# Altium integrated library Grippy_Diddy_Proj.IntLib: 5 symbols
Pins are listed as number, name and electrical type; pins without a type are passive.

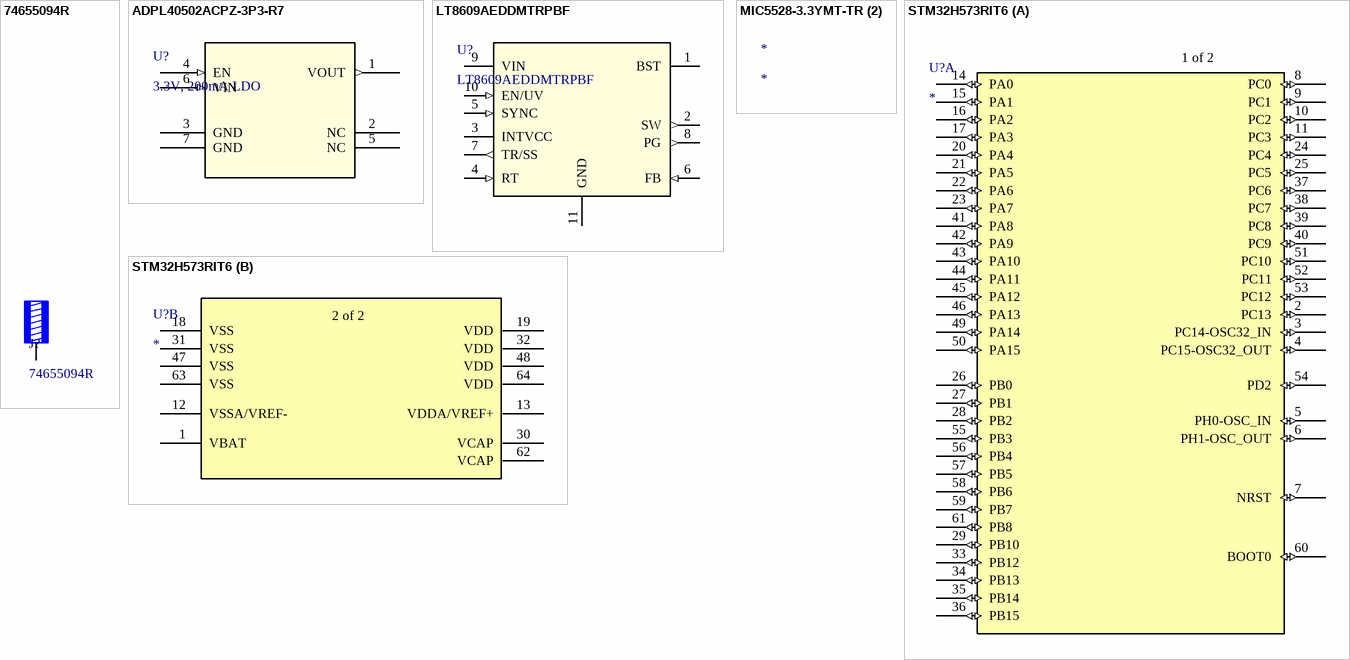
[diagram p0: symbols 74655094R to STM32H573RIT6]

## 74655094R
designator J?
WP-THRBU REDCUBE THR internal through-hole thread, M4 x 2.5mm, 50A; ComponentLink1Description: website; ComponentLink1URL: https://www.we-online.com/redexpert/article/74650074R?ad; ComponentLink2Description: datasheet; ComponentLink2URL: https://www.we-online.com/redexpert/spec/74650074R?ad
footprint 74655094R (REDCUBE THR with internal thread, M4x2.5mm, through)
pins: 1
text: /

## ADPL40502ACPZ-3P3-R7
designator U?, comment 3.3V, 200mA LDO
footprint LFCSP-UD (2x2)
pins: 1 VOUT (out), 2 NC, 3 GND (power), 4 EN (in), 5 NC, 6 VIN (in), 7 GND (power)

## LT8609AEDDMTRPBF
designator U?
Buck Switching Regulator IC Positive Adjustable 0.782V 1 Output 3A 10-WFDFN Exposed Pad; ComponentLink1Description: Digikey; ComponentLink1URL: https://www.digikey.com/en/products/detail/analog-devices-inc/LT8609AEDDM-TRPBF/10668739; ComponentLink2Description: Datasheet; ComponentLink2URL: https://www.analog.com/media/en/technical-documentation/data-sheets/LT8609-8609A-8609B.pdf
footprint 10-WDFN
pins: 1 BST (power), 2 SW (out), 3 INTVCC (power), 4 RT (in), 5 SYNC (in), 6 FB (in), 7 TR/SS (out), 8 PG (out), 9 VIN (power), 10 EN/UV (in), 11 GND (power)

## MIC5528-3.3YMT-TR (2)
designator *
LDO Voltage Regulator, Fixed, 2.5 V to 5.5 V, 1 Output, 260mV @ 500mA, 3.3 V, 500 mA, 6 Pins; Manufacturer: Microchip; Manufacturer Part Number: MIC5528-3.3YMT-TR; Manufacturer Lifecycle Status: REL; Accuracy: 2%; Max Junction Temperature (Tj): 125°C; Max Supply Voltage: 5.5V; Min Supply Voltage: 2.5V; Number of Channels: 1; Output Voltage: 3.3V; Supplier: Newark; Supplier Part Number: MIC5528-3.3YMT-TR; RoHS: Compliant; Category: LDO Voltage Regulators; Stock: 9336; Pricing: 1=0.314, 50=0.284, 100=0.278 (USD); Projected EOL Date: 2039-05-19; Country of Assembly: China; Country of Fabrication: South Korea; Country of Origin: China; Dropout Voltage: 260mV; Export Control Classification Number (ECCN) Code: EAR99; Height: 600µm; HS Code: 8542.39.0090; Harmonized Tariff Schedule (HTS) Code: 8542.39.0060; Lifecycle Status: Production; Max Operating Temperature: 125°C; Min Operating Temperature: -40°C; Number of Outputs: 1; Pins: 6; Output Current: 500mA; Schedule B: 8542390000, 8542390000|8542390000|8542390000|8542390000|8542390000; ComponentLink1URL: https://datasheet.octopart.com:443/MIC5528-3.3YMT-TR-Microchip-datasheet-147335848.pdf?src-supplier=Microchip; ComponentLink1Description: https://datasheet.octopart.com:443/MIC5528-3.3YMT-TR-Microchip-datasheet-147335848.pdf?src-supplier=Microchip; ComponentLink2URL: https://datasheet.octopart.com:443/MIC5528-3.3YMT-TR-Microchip-datasheet-33028824.pdf?src-supplier=SHENGYU+ELECTRONICS; ComponentLink2Description: https://datasheet.octopart.com:443/MIC5528-3.3YMT-TR-Microchip-datasheet-33028824.pdf?src-supplier=SHENGYU+ELECTRONICS; ComponentLink3URL: https://datasheet.octopart.com:443/MIC5528-3.3YMT-TR-Microchip-datasheet-154741890.pdf?src-supplier=Electro+Sonic; ComponentLink3Description: https://datasheet.octopart.com:443/MIC5528-3.3YMT-TR-Microchip-datasheet-154741890.pdf?src-supplier=Electro+Sonic; ComponentLink4URL: http://sigma.octopart.com:80/188455757/materials_sheet/Microchip-MIC5528-3.3YMT-TR.pdf?src-supplier=Compliance+Statements; ComponentLink4Description: http://sigma.octopart.com:80/188455757/materials_sheet/Microchip-MIC5528-3.3YMT-TR.pdf?src-supplier=Compliance+Statements; ComponentLink5URL: http://sigma.octopart.com:80/rohs_statement/Microchip-company-71.pdf?src-supplier=Compliance+Statements; ComponentLink5Description: http://sigma.octopart.com:80/rohs_statement/Microchip-company-71.pdf?src-supplier=Compliance+Statements; ComponentLink6URL: http://sigma.octopart.com:80/reach_statement/Microchip-company-70.pdf?src-supplier=Compliance+Statements; ComponentLink6Description: http://sigma.octopart.com:80/reach_statement/Microchip-company-70.pdf?src-supplier=Compliance+Statements; ComponentLink7URL: http://sigma.octopart.com:80/conflict_mineral_statement/Microchip-company-69.pdf?src-supplier=Compliance+Statements; ComponentLink7Description: http://sigma.octopart.com:80/conflict_mineral_statement/Microchip-company-69.pdf?src-supplier=Compliance+Statements; ComponentLink8URL: http://sigma.octopart.com:80/conflict_mineral_statement/Microchip-company-68.pdf?src-supplier=Compliance+Statements; ComponentLink8Description: http://sigma.octopart.com:80/conflict_mineral_statement/Microchip-company-68.pdf?src-supplier=Compliance+Statements

## STM32H573RIT6
designator U?
grippy MCU
footprint LQFP64 (10x10mm)
part A pins: 2 PC13 (io), 3 PC14-OSC32_IN (io), 4 PC15-OSC32_OUT (io), 5 PH0-OSC_IN (io), 6 PH1-OSC_OUT (io), 7 NRST (io), 8 PC0 (io), 9 PC1 (io), 10 PC2 (io), 11 PC3 (io), 14 PA0 (io), 15 PA1 (io), 16 PA2 (io), 17 PA3 (io), 20 PA4 (io), 21 PA5 (io), 22 PA6 (io), 23 PA7 (io), 24 PC4 (io), 25 PC5 (io), 26 PB0 (io), 27 PB1 (io), 28 PB2 (io), 29 PB10 (io), 33 PB12 (io), 34 PB13 (io), 35 PB14 (io), 36 PB15 (io), 37 PC6 (io), 38 PC7 (io), 39 PC8 (io), 40 PC9 (io), 41 PA8 (io), 42 PA9 (io), 43 PA10 (io), 44 PA11 (io), 45 PA12 (io), 46 PA13 (io), 49 PA14 (io), 50 PA15 (io), 51 PC10 (io), 52 PC11 (io), 53 PC12 (io), 54 PD2 (io), 55 PB3 (io), 56 PB4 (io), 57 PB5 (io), 58 PB6 (io), 59 PB7 (io), 60 BOOT0 (io), 61 PB8 (io)
part B pins: 1 VBAT (power), 12 VSSA/VREF- (power), 13 VDDA/VREF+ (power), 18 VSS (power), 19 VDD (power), 30 VCAP (power), 31 VSS (power), 32 VDD (power), 47 VSS (power), 48 VDD (power), 62 VCAP (power), 63 VSS (power), 64 VDD (power)
part A text: 1 of 2
part B text: 2 of 2